# Altium footprint library Connector_ScrewTerminal.PcbLib: 17 footprints (part 2 of 2)
Each footprint in its own frame and in the unit in brackets; x right, y up, seen from the top. Pads: shape width x height; smd on the part's side, far side on the other; paste and mask are expansions set on the pad; w line width, h text height; cw(c..) or ccw(c..) is an arc to the next point about the centre after c.
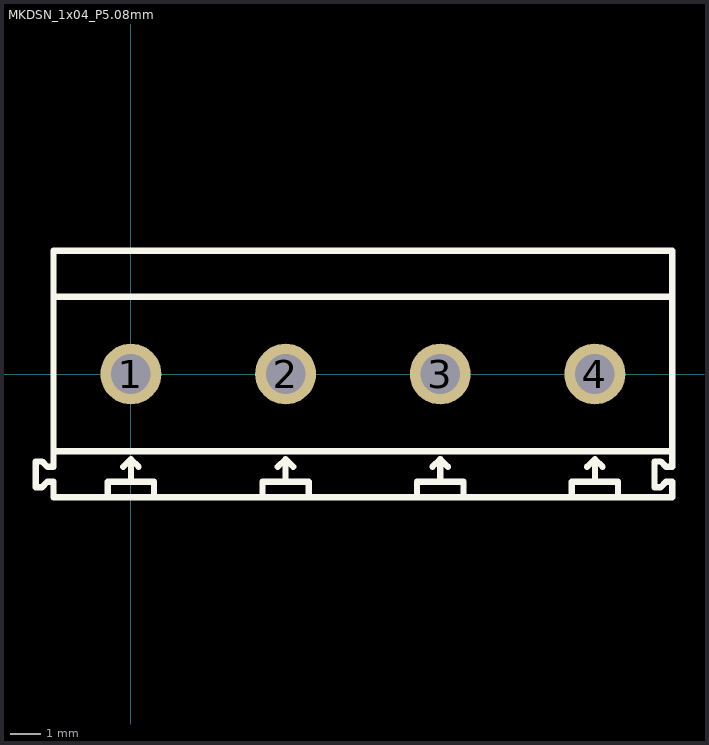
[diagram p1: the footprint, top view; thin cyan lines are the x and y axes]

## MKDSN_1x04_P5.08mm [mm]
pads (4):
  round 2 hole 1.3: 1(0,0) 2(5.08,0) 3(10.16,0) 4(15.24,0)
Top Overlay:
  lines w0.203: -2.54,2.54 17.78,2.54 ; -0.762,-4.05 -0.762,-3.542 0.762,-3.542 0.762,-4.05 ; -0.254,-3.048 0,-2.794 ; 0,-3.542 0,-2.794 ; 0.254,-3.048 0,-2.794 ; 4.318,-4.05 4.318,-3.542 5.842,-3.542 5.842,-4.05 ; 4.826,-3.048 5.08,-2.794 ; 5.08,-3.542 5.08,-2.794 ; 5.334,-3.048 5.08,-2.794 ; 9.398,-4.05 9.398,-3.542 10.922,-3.542 10.922,-4.05 ; 9.906,-3.048 10.16,-2.794 ; 10.16,-3.542 10.16,-2.794 ; 10.414,-3.048 10.16,-2.794 ; 14.478,-4.05 14.478,-3.542 16.002,-3.542 16.002,-4.05 ; 14.986,-3.048 15.24,-2.794 ; 15.24,-3.542 15.24,-2.794 ; 15.494,-3.048 15.24,-2.794 ; -2.54,-2.54 -2.54,4.05 17.78,4.05 17.78,-2.54 ; -2.54,-2.54 17.78,-2.54 ; -2.54,-2.54 -2.54,-3.048 -2.743,-3.048 -2.921,-2.87 -3.124,-2.87 -3.124,-3.72 -2.921,-3.72 -2.743,-3.542 -2.54,-3.542 -2.54,-4.05 17.78,-4.05 17.78,-3.542 17.577,-3.542 17.399,-3.72 17.196,-3.72 17.196,-2.87 17.399,-2.87 17.577,-3.048 17.78,-3.048 17.78,-2.54
3D body "1729144.stp": height 10.1, standoff -3.4, extent -3.11,-4.036 17.78,4.064